# Altium footprint library AVP32F335-V1.1.PcbLib: 2 footprints
Each footprint in its own frame and in the unit in brackets; x right, y up, seen from the top. Pads: shape width x height; smd on the part's side, far side on the other; paste and mask are expansions set on the pad; w line width, h text height; cw(c..) or ccw(c..) is an arc to the next point about the centre after c.
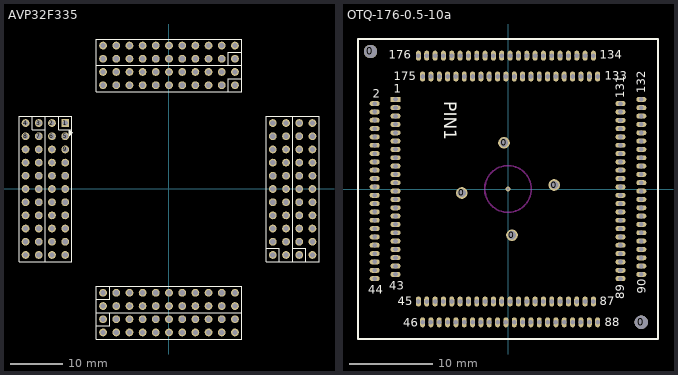
[diagram p0: the footprints below, top view; thin cyan lines are the x and y axes]

## AVP32F335 [mm]
height 0.9
pads (176):
  rect 1.5x1.5 hole 1: 1(-20,12.7)
  round 1.5 hole 1: 2(-22.54,12.7) 3(-25.08,12.7) 4(-27.62,12.7) 5(-20,10.16) 6(-22.54,10.16) 7(-25.08,10.16) 8(-27.62,10.16) 9(-20,7.62) 10(-22.54,7.62) 11(-25.08,7.62) 12(-27.62,7.62) 13(-20,5.08) 14(-22.54,5.08) 15(-25.08,5.08) 16(-27.62,5.08) 17(-20,2.54) 18(-22.54,2.54) 19(-25.08,2.54) 20(-27.62,2.54) 21(-20,0) 22(-22.54,0) 23(-25.08,0) 24(-27.62,0) 25(-20,-2.54) 26(-22.54,-2.54) 27(-25.08,-2.54) 28(-27.62,-2.54) 29(-20,-5.08) 30(-22.54,-5.08) 31(-25.08,-5.08) 32(-27.62,-5.08) 33(-20,-7.62) 34(-22.54,-7.62) 35(-25.08,-7.62) 36(-27.62,-7.62) 37(-20,-10.16) 38(-22.54,-10.16) 39(-25.08,-10.16) 40(-27.62,-10.16) 41(-20,-12.7) 42(-22.54,-12.7) 43(-25.08,-12.7) 44(-27.62,-12.7) 45(-12.7,-20) 46(-12.7,-22.54) 47(-12.7,-25.08) 48(-12.7,-27.62) 49(-10.16,-20) 50(-10.16,-22.54) 51(-10.16,-25.08) 52(-10.16,-27.62) 53(-7.62,-20) 54(-7.62,-22.54) 55(-7.62,-25.08) 56(-7.62,-27.62) 57(-5.08,-20) 58(-5.08,-22.54) 59(-5.08,-25.08) 60(-5.08,-27.62) 61(-2.54,-20) 62(-2.54,-22.54) 63(-2.54,-25.08) 64(-2.54,-27.62) 65(0,-20) 66(0,-22.54) 67(0,-25.08) 68(0,-27.62) 69(2.54,-20) 70(2.54,-22.54) 71(2.54,-25.08) 72(2.54,-27.62) 73(5.08,-20) 74(5.08,-22.54) 75(5.08,-25.08) 76(5.08,-27.62) 77(7.62,-20) 78(7.62,-22.54) 79(7.62,-25.08) 80(7.62,-27.62) 81(10.16,-20) 82(10.16,-22.54) 83(10.16,-25.08) 84(10.16,-27.62) 85(12.7,-20) 86(12.7,-22.54) 87(12.7,-25.08) 88(12.7,-27.62) 89(20,-12.7) 90(22.54,-12.7) 91(25.08,-12.7) 92(27.62,-12.7) 93(20,-10.16) 94(22.54,-10.16) 95(25.08,-10.16) 96(27.62,-10.16) 97(20,-7.62) 98(22.54,-7.62) 99(25.08,-7.62) 100(27.62,-7.62) 101(20,-5.08) 102(22.54,-5.08) 103(25.08,-5.08) 104(27.62,-5.08) 105(20,-2.54) 106(22.54,-2.54) 107(25.08,-2.54) 108(27.62,-2.54) 109(20,0) 110(22.54,0) 111(25.08,0) 112(27.62,0) 113(20,2.54) 114(22.54,2.54) 115(25.08,2.54) 116(27.62,2.54) 117(20,5.08) 118(22.54,5.08) 119(25.08,5.08) 120(27.62,5.08) 121(20,7.62) 122(22.54,7.62) 123(25.08,7.62) 124(27.62,7.62) 125(20,10.16) 126(22.54,10.16) 127(25.08,10.16) 128(27.62,10.16) 129(20,12.7) 130(22.54,12.7) 131(25.08,12.7) 132(27.62,12.7) 133(12.7,20) 134(12.7,22.54) 135(12.7,25.08) 136(12.7,27.62) 137(10.16,20) 138(10.16,22.54) 139(10.16,25.08) 140(10.16,27.62) 141(7.62,20) 142(7.62,22.54) 143(7.62,25.08) 144(7.62,27.62) 145(5.08,20) 146(5.08,22.54) 147(5.08,25.08) 148(5.08,27.62) 149(2.54,20) 150(2.54,22.54) 151(2.54,25.08) 152(2.54,27.62) 153(0,20) 154(0,22.54) 155(0,25.08) 156(0,27.62) 157(-2.54,20) 158(-2.54,22.54) 159(-2.54,25.08) 160(-2.54,27.62) 161(-5.08,20) 162(-5.08,22.54) 163(-5.08,25.08) 164(-5.08,27.62) 165(-7.62,20) 166(-7.62,22.54) 167(-7.62,25.08) 168(-7.62,27.62) 169(-10.16,20) 170(-10.16,22.54) 171(-10.16,25.08) 172(-10.16,27.62) 173(-12.7,20) 174(-12.7,22.54) 175(-12.7,25.08) 176(-12.7,27.62)
Top Overlay:
  lines w0.15: -26.35,13.97 -26.35,11.43 -23.81,11.43 ; -21.27,13.97 -21.27,11.43 -18.73,11.43 ; -13.97,-26.35 -11.43,-26.35 -11.43,-23.81 ; -13.97,-21.27 -11.43,-21.27 -11.43,-18.73 ; 11.43,18.73 11.43,21.27 13.97,21.27 ; 11.43,23.81 11.43,26.35 13.97,26.35 ; 18.73,-11.43 21.27,-11.43 21.27,-13.97 ; 23.81,-11.43 26.35,-11.43 26.35,-13.97 ; -28.89,-13.97 -28.89,13.97 -23.81,13.97 ; -28.89,-13.97 -23.81,-13.97 ; -28.89,-13.97 -23.81,-13.97 ; -23.81,-13.97 -23.81,13.97 ; -23.81,-13.97 -18.73,-13.97 ; -23.81,-13.97 -18.73,-13.97 ; -23.81,-13.97 -23.81,13.97 ; -23.81,13.97 -18.73,13.97 -18.73,-13.97 ; -13.97,-23.81 -13.97,-18.73 13.97,-18.73 ; -13.97,-23.81 13.97,-23.81 ; -13.97,-23.81 13.97,-23.81 ; -13.97,-23.81 -13.97,-28.89 13.97,-28.89 ; -13.97,18.73 13.97,18.73 13.97,23.81 ; -13.97,18.73 -13.97,23.81 ; -13.97,18.73 -13.97,23.81 ; -13.97,23.81 13.97,23.81 ; -13.97,23.81 -13.97,28.89 ; -13.97,23.81 -13.97,28.89 ; -13.97,23.81 13.97,23.81 ; -13.97,28.89 13.97,28.89 13.97,23.81 ; 13.97,-28.89 13.97,-23.81 ; 13.97,-28.89 13.97,-23.81 ; 13.97,-23.81 13.97,-18.73 ; 13.97,-23.81 13.97,-18.73 ; 18.73,13.97 18.73,-13.97 23.81,-13.97 ; 18.73,13.97 23.81,13.97 ; 18.73,13.97 23.81,13.97 ; 23.81,-13.97 23.81,13.97 ; 23.81,-13.97 23.81,13.97 ; 23.81,-13.97 28.89,-13.97 28.89,13.97 ; 23.81,13.97 28.89,13.97 ; 23.81,13.97 28.89,13.97
  lines w0.2: -19.177,10.679 -19.05,10.806 -18.669,10.806 ; -19.05,10.469 -19.05,11.187 -19.177,11.314 ; -18.923,10.552 -18.923,10.933 -18.86,10.997 ; -19.177,11.314 -18.669,10.806 ; -19.177,11.314 -19.177,10.298 -18.669,10.806

## OTQ-176-0.5-10a [mm]
height 0.9
pads (182):
  round 1.6 hole 1.6: 0(-16.5,16.5) 0(16,-16)
  round 1.4 hole 1: 0(-5.54,-0.48) 0(-0.48,5.54) 0(0.48,-5.54) 0(5.54,0.48)
  rect 1.2x0.6 hole 0.55: 1(-13.5,10.75)
  oval 1.2x0.6 hole 0.55: 2(-16,10.25) 3(-13.5,9.75) 4(-16,9.25) 5(-13.5,8.75) 6(-16,8.25) 7(-13.5,7.75) 8(-16,7.25) 9(-13.5,6.75) 10(-16,6.25) 11(-13.5,5.75) 12(-16,5.25) 13(-13.5,4.75) 14(-16,4.25) 15(-13.5,3.75) 16(-16,3.25) 17(-13.5,2.75) 18(-16,2.25) 19(-13.5,1.75) 20(-16,1.25) 21(-13.5,0.75) 22(-16,0.25) 23(-13.5,-0.25) 24(-16,-0.75) 25(-13.5,-1.25) 26(-16,-1.75) 27(-13.5,-2.25) 28(-16,-2.75) 29(-13.5,-3.25) 30(-16,-3.75) 31(-13.5,-4.25) 32(-16,-4.75) 33(-13.5,-5.25) 34(-16,-5.75) 35(-13.5,-6.25) 36(-16,-6.75) 37(-13.5,-7.25) 38(-16,-7.75) 39(-13.5,-8.25) 40(-16,-8.75) 41(-13.5,-9.25) 42(-16,-9.75) 43(-13.5,-10.25) 44(-16,-10.75) 89(13.5,-10.75) 90(16,-10.25) 91(13.5,-9.75) 92(16,-9.25) 93(13.5,-8.75) 94(16,-8.25) 95(13.5,-7.75) 96(16,-7.25) 97(13.5,-6.75) 98(16,-6.25) 99(13.5,-5.75) 100(16,-5.25) 101(13.5,-4.75) 102(16,-4.25) 103(13.5,-3.75) 104(16,-3.25) 105(13.5,-2.75) 106(16,-2.25) 107(13.5,-1.75) 108(16,-1.25) 109(13.5,-0.75) 110(16,-0.25) 111(13.5,0.25) 112(16,0.75) 113(13.5,1.25) 114(16,1.75) 115(13.5,2.25) 116(16,2.75) 117(13.5,3.25) 118(16,3.75) 119(13.5,4.25) 120(16,4.75) 121(13.5,5.25) 122(16,5.75) 123(13.5,6.25) 124(16,6.75) 125(13.5,7.25) 126(16,7.75) 127(13.5,8.25) 128(16,8.75) 129(13.5,9.25) 130(16,9.75) 131(13.5,10.25) 132(16,10.75)
  oval 0.6x1.2 hole 0.55: 45(-10.75,-13.5) 46(-10.25,-16) 47(-9.75,-13.5) 48(-9.25,-16) 49(-8.75,-13.5) 50(-8.25,-16) 51(-7.75,-13.5) 52(-7.25,-16) 53(-6.75,-13.5) 54(-6.25,-16) 55(-5.75,-13.5) 56(-5.25,-16) 57(-4.75,-13.5) 58(-4.25,-16) 59(-3.75,-13.5) 60(-3.25,-16) 61(-2.75,-13.5) 62(-2.25,-16) 63(-1.75,-13.5) 64(-1.25,-16) 65(-0.75,-13.5) 66(-0.25,-16) 67(0.25,-13.5) 68(0.75,-16) 69(1.25,-13.5) 70(1.75,-16) 71(2.25,-13.5) 72(2.75,-16) 73(3.25,-13.5) 74(3.75,-16) 75(4.25,-13.5) 76(4.75,-16) 77(5.25,-13.5) 78(5.75,-16) 79(6.25,-13.5) 80(6.75,-16) 81(7.25,-13.5) 82(7.75,-16) 83(8.25,-13.5) 84(8.75,-16) 85(9.25,-13.5) 86(9.75,-16) 87(10.25,-13.5) 88(10.75,-16) 133(10.75,13.5) 134(10.25,16) 135(9.75,13.5) 136(9.25,16) 137(8.75,13.5) 138(8.25,16) 139(7.75,13.5) 140(7.25,16) 141(6.75,13.5) 142(6.25,16) 143(5.75,13.5) 144(5.25,16) 145(4.75,13.5) 146(4.25,16) 147(3.75,13.5) 148(3.25,16) 149(2.75,13.5) 150(2.25,16) 151(1.75,13.5) 152(1.25,16) 153(0.75,13.5) 154(0.25,16) 155(-0.25,13.5) 156(-0.75,16) 157(-1.25,13.5) 158(-1.75,16) 159(-2.25,13.5) 160(-2.75,16) 161(-3.25,13.5) 162(-3.75,16) 163(-4.25,13.5) 164(-4.75,16) 165(-5.25,13.5) 166(-5.75,16) 167(-6.25,13.5) 168(-6.75,16) 169(-7.25,13.5) 170(-7.75,16) 171(-8.25,13.5) 172(-8.75,16) 173(-9.25,13.5) 174(-9.75,16) 175(-10.25,13.5) 176(-10.75,16)
via 0,0 diameter 0.6 hole 0.4
Top Overlay:
  lines w0.254: -18,-18 -18,18 18,18 18,-18 -18,-18
  text "175" at -13.693,13.074 h1
  text "176" at -14.328,15.614 h1
  text "44" at -16.764,-12.573 h1
  text "43" at -14.224,-12.065 h1
  text "134" at 11.004,15.659 h1
  text "133" at 11.639,13.119 h1
  text "131" at 13.932,10.877 h1
  text "132" at 16.472,11.512 h1
  text "89" at 13.97,-13.208 h1
  text "90" at 16.51,-12.573 h1
  text "87" at 11.004,-13.932 h1
  text "88" at 11.639,-16.472 h1
  text "46" at -12.573,-16.51 h1
  text "45" at -13.208,-13.97 h1
  text "1" at -13.716,11.557 h1
  text "PIN1" at -7.62,10.541 h1.5
  text "2" at -16.256,10.922 h1
Keep-Out Layer:
  circle w0.2: c0,0 r2.8